# Altium schematic symbol library TN1215-600B-TR.SchLib: 1 symbol
Pins are listed as number, name and electrical type; pins without a type are passive.

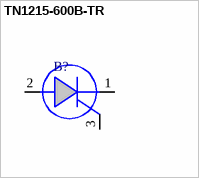
[diagram p0: symbol TN1215-600B-TR]

## TN1215-600B-TR
designator B?
SCR 600V 12A Standard Recovery Surface Mount DPAK; Manufacturer_Name: STMicroelectronics; Geometry.Height: 2.63mm; Mouser Part Number: 511-TN1215-600B-TR; Mouser Price/Stock: https://www.mouser.co.uk/ProductDetail/STMicroelectronics/TN1215-600B-TR?qs=JQs6Bl0TY0oFh73kuIh3ZA%3D%3D; Manufacturer_Part_Number: TN1215-600B-TR; Datasheet Link: https://www.st.com/resource/en/datasheet/tyn1012.pdf
footprint TN1215600BTR
pins: 1 K, 2 A, 3 G